# Altium footprint library Serigrafias.PcbLib: 12 footprints
Each footprint in its own frame and in the unit in brackets; x right, y up, seen from the top. Pads: shape width x height; smd on the part's side, far side on the other; paste and mask are expansions set on the pad; w line width, h text height; cw(c..) or ccw(c..) is an arc to the next point about the centre after c.
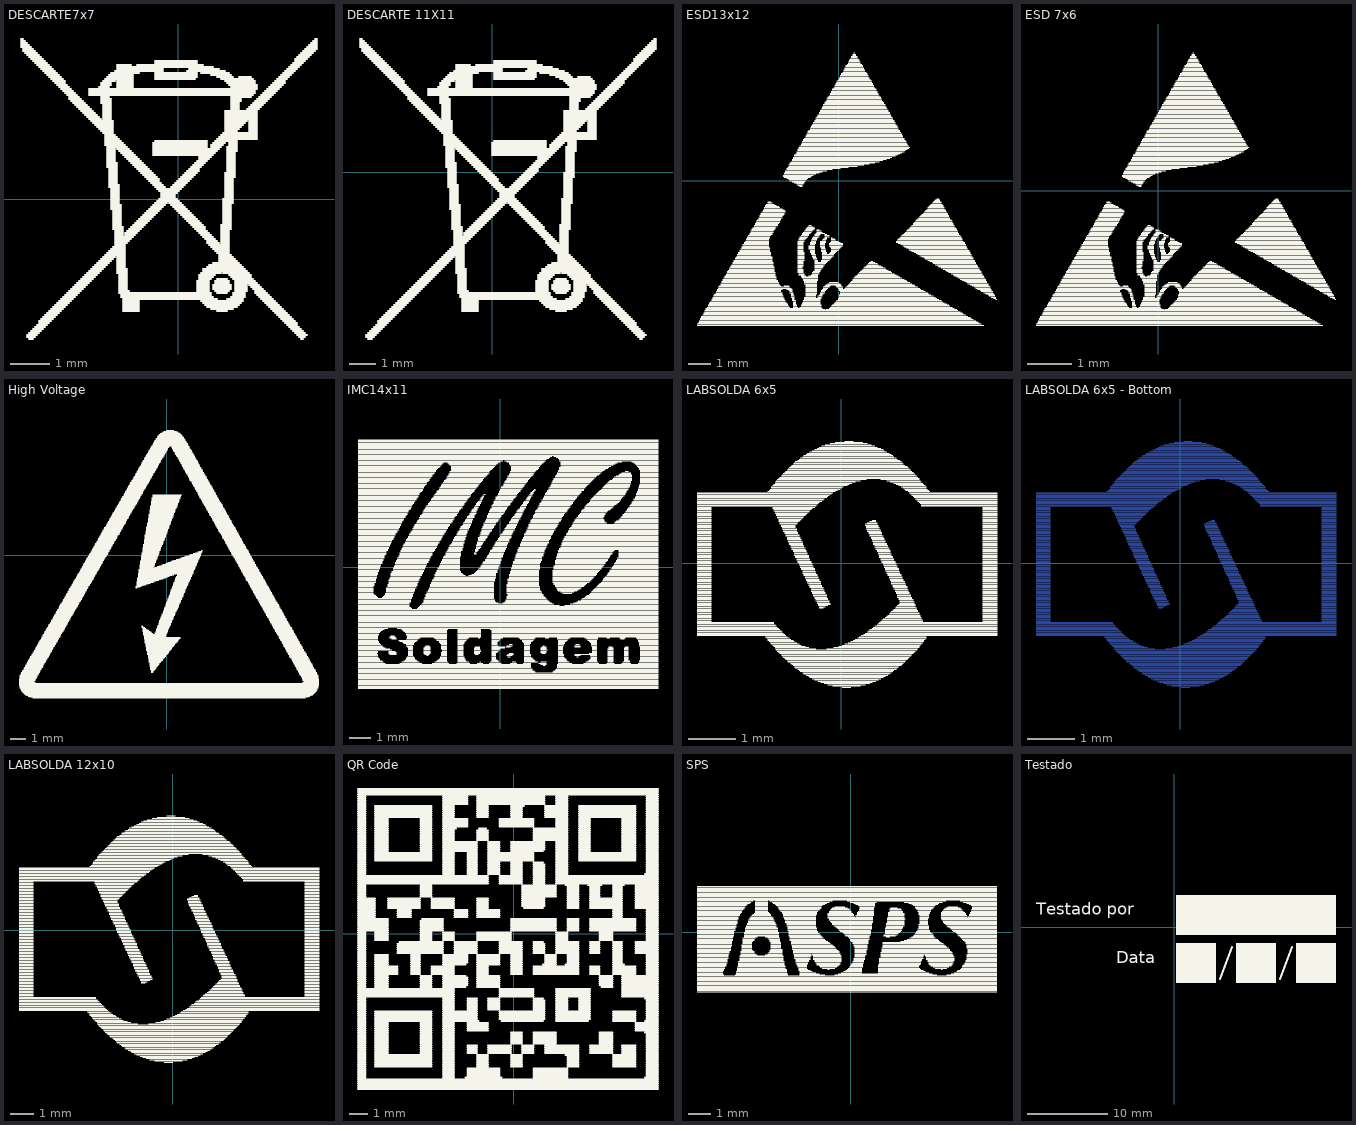
[diagram p0: the footprints below, top view; thin cyan lines are the x and y axes]

## DESCARTE7x7 [mm]
Top Overlay:
  drawing of 517 lines, arcs and shapes, not listed

## DESCARTE 11X11 [mm]
Top Overlay:
  drawing of 517 lines, arcs and shapes, not listed

## ESD13x12 [mm]
Top Overlay:
  drawing of 557 lines, arcs and shapes, not listed

## ESD 7x6 [mm]
Top Overlay:
  drawing of 557 lines, arcs and shapes, not listed

## High Voltage [mm]
Top Overlay:
  drawing of 950 lines, arcs and shapes, not listed

## IMC14x11 [mm]
Top Overlay:
  drawing of 1294 lines, arcs and shapes, not listed

## LABSOLDA 6x5 [mm]
Top Overlay:
  drawing of 518 lines, arcs and shapes, not listed

## LABSOLDA 6x5 - Bottom [mm]
Bottom Layer:
  lines w0.025: -3.048,-1.524 -1.168,-1.524 ; -3.048,-1.499 -1.194,-1.499 ; -3.048,-1.473 -1.219,-1.473 ; -3.048,-1.448 -1.245,-1.448 ; -3.048,-1.422 -1.27,-1.422 ; -3.048,-1.397 -1.295,-1.397 ; -3.048,-1.372 -1.321,-1.372 ; -3.048,-1.346 -1.346,-1.346 ; -3.048,-1.321 -1.372,-1.321 ; -3.048,-1.295 -1.397,-1.295 ; -3.048,-1.27 -1.422,-1.27 ; -3.048,-1.245 -1.422,-1.245 ; -3.048,-1.219 -2.743,-1.219 ; -3.048,-1.194 -2.743,-1.194 ; -3.048,-1.168 -2.743,-1.168 ; -3.048,-1.143 -2.743,-1.143 ; -3.048,-1.118 -2.743,-1.118 ; -3.048,-1.092 -2.743,-1.092 ; -3.048,-1.067 -2.743,-1.067 ; -3.048,-1.041 -2.743,-1.041 ; -3.048,-1.016 -2.743,-1.016 ; -3.048,-0.991 -2.743,-0.991 ; -3.048,-0.965 -2.743,-0.965 ; -3.048,-0.94 -2.743,-0.94 ; -3.048,-0.914 -2.743,-0.914 ; -3.048,-0.889 -2.743,-0.889 ; -3.048,-0.864 -2.743,-0.864 ; -3.048,-0.838 -2.743,-0.838 ; -3.048,-0.813 -2.743,-0.813 ; -3.048,-0.787 -2.743,-0.787 ; -3.048,-0.762 -2.743,-0.762 ; -3.048,-0.737 -2.743,-0.737 ; -3.048,-0.711 -2.743,-0.711 ; -3.048,-0.686 -2.743,-0.686 ; -3.048,-0.66 -2.743,-0.66 ; -3.048,-0.635 -2.743,-0.635 ; -3.048,-0.61 -2.743,-0.61 ; -3.048,-0.584 -2.743,-0.584 ; -3.048,-0.559 -2.743,-0.559 ; -3.048,-0.533 -2.743,-0.533 ; -3.048,-0.508 -2.743,-0.508 ; -3.048,-0.483 -2.743,-0.483 ; -3.048,-0.457 -2.743,-0.457 ; -3.048,-0.432 -2.743,-0.432 ; -3.048,-0.406 -2.743,-0.406 ; -3.048,-0.381 -2.743,-0.381 ; -3.048,-0.356 -2.743,-0.356 ; -3.048,-0.33 -2.743,-0.33 ; -3.048,-0.305 -2.743,-0.305 ; -3.048,-0.279 -2.743,-0.279 ; -3.048,-0.254 -2.743,-0.254 ; -3.048,-0.229 -2.743,-0.229 ; -3.048,-0.203 -2.743,-0.203 ; -3.048,-0.178 -2.743,-0.178 ; -3.048,-0.152 -2.743,-0.152 ; -3.048,-0.127 -2.743,-0.127 ; -3.048,-0.102 -2.743,-0.102 ; -3.048,-0.076 -2.743,-0.076 ; -3.048,-0.051 -2.743,-0.051 ; -3.048,-0.025 -2.743,-0.025 ; -3.048,0 -2.743,0 ; -3.048,0.025 -2.743,0.025 ; -3.048,0.051 -2.743,0.051 ; -3.048,0.076 -2.743,0.076 ; -3.048,0.102 -2.743,0.102 ; -3.048,0.127 -2.743,0.127 ; -3.048,0.152 -2.743,0.152 ; -3.048,0.178 -2.743,0.178 ; -3.048,0.203 -2.743,0.203 ; -3.048,0.229 -2.743,0.229 ; -3.048,0.254 -2.743,0.254 ; -3.048,0.279 -2.743,0.279 ; -3.048,0.305 -2.743,0.305 ; -3.048,0.33 -2.743,0.33 ; -3.048,0.356 -2.743,0.356 ; -3.048,0.381 -2.743,0.381 ; -3.048,0.406 -2.743,0.406 ; -3.048,0.432 -2.743,0.432 ; -3.048,0.457 -2.743,0.457 ; -3.048,0.483 -2.743,0.483 ; -3.048,0.508 -2.743,0.508 ; -3.048,0.533 -2.743,0.533 ; -3.048,0.559 -2.743,0.559 ; -3.048,0.584 -2.743,0.584 ; -3.048,0.61 -2.743,0.61 ; -3.048,0.635 -2.743,0.635 ; -3.048,0.66 -2.743,0.66 ; -3.048,0.686 -2.743,0.686 ; -3.048,0.711 -2.743,0.711 ; -3.048,0.737 -2.743,0.737 ; -3.048,0.762 -2.743,0.762 ; -3.048,0.787 -2.743,0.787 ; -3.048,0.813 -2.743,0.813 ; -3.048,0.838 -2.743,0.838 ; -3.048,0.864 -2.743,0.864 ; -3.048,0.889 -2.743,0.889 ; -3.048,0.914 -2.743,0.914 ; -3.048,0.94 -2.743,0.94 ; -3.048,0.965 -2.743,0.965 ; -3.048,0.991 -2.743,0.991 ; -3.048,1.016 -2.743,1.016 ; -3.048,1.041 -2.743,1.041 ; -3.048,1.067 -2.743,1.067 ; -3.048,1.092 -2.743,1.092 ; -3.048,1.118 -2.743,1.118 ; -3.048,1.143 -2.743,1.143 ; -3.048,1.168 -2.743,1.168 ; -3.048,1.194 -2.743,1.194 ; -3.048,1.219 -0.533,1.219 ; -3.048,1.245 -0.508,1.245 ; -3.048,1.27 -0.483,1.27 ; -3.048,1.295 -0.457,1.295 ; -3.048,1.321 -0.406,1.321 ; -3.048,1.346 -0.381,1.346 ; -3.048,1.372 -0.356,1.372 ; -3.048,1.397 -0.305,1.397 ; -3.048,1.422 -0.279,1.422 ; -3.048,1.448 -0.254,1.448 ; -3.048,1.473 -0.203,1.473 ; -3.048,1.499 -0.178,1.499 ; -1.6,-1.549 -1.143,-1.549 ; -1.575,-1.575 -1.092,-1.575 ; -1.549,-1.626 -1.016,-1.626 ; -1.549,-1.6 -1.067,-1.6 ; -1.549,1.524 -0.127,1.524 ; -1.524,-1.651 -0.991,-1.651 ; -1.524,1.549 -0.076,1.549 ; -1.499,-1.676 -0.94,-1.676 ; -1.499,1.575 -0.025,1.575 ; -1.473,-1.702 -0.889,-1.702 ; -1.473,1.6 0,1.6 ; -1.473,1.626 0.051,1.626 ; -1.448,-1.727 -0.838,-1.727 ; -1.448,1.168 -0.61,1.168 ; -1.448,1.194 -0.559,1.194 ; -1.448,1.651 0.127,1.651 ; -1.422,-1.753 -0.762,-1.753 ; -1.422,1.118 -0.66,1.118 ; -1.422,1.143 -0.635,1.143 ; -1.422,1.676 0.178,1.676 ; -1.397,-1.803 -0.533,-1.803 ; -1.397,-1.778 -0.686,-1.778 ; -1.397,1.067 -0.711,1.067 ; -1.397,1.092 -0.686,1.092 ; -1.397,1.702 0.229,1.702 ; -1.397,1.727 0.305,1.727 ; -1.372,-1.829 1.6,-1.829 ; -1.372,1.016 -0.762,1.016 ; -1.372,1.041 -0.737,1.041 ; -1.372,1.753 0.406,1.753 ; -1.346,-1.854 1.575,-1.854 ; -1.346,0.965 -0.813,0.965 ; -1.346,0.991 -0.787,0.991 ; -1.346,1.778 0.533,1.778 ; -1.321,-1.88 1.549,-1.88 ; -1.321,0.889 -0.889,0.889 ; -1.321,0.914 -0.864,0.914 ; -1.321,0.94 -0.838,0.94 ; -1.321,1.803 1.651,1.803 ; -1.295,-1.905 1.524,-1.905 ; -1.295,0.838 -0.94,0.838 ; -1.295,0.864 -0.914,0.864 ; -1.295,1.829 1.626,1.829 ; -1.27,-1.93 1.499,-1.93 ; -1.27,0.787 -0.965,0.787 ; -1.27,0.813 -0.965,0.813 ; -1.27,1.854 1.6,1.854 ; -1.245,-1.956 1.473,-1.956 ; -1.245,0.737 -0.94,0.737 ; -1.245,0.762 -0.965,0.762 ; -1.245,1.88 1.575,1.88 ; -1.219,-1.981 1.448,-1.981 ; -1.219,0.686 -0.94,0.686 ; -1.219,0.711 -0.94,0.711 ; -1.219,1.905 1.549,1.905 ; -1.194,-2.007 1.422,-2.007 ; -1.194,0.635 -0.914,0.635 ; -1.194,0.66 -0.914,0.66 ; -1.194,1.93 1.524,1.93 ; -1.168,-2.032 1.397,-2.032 ; -1.168,0.584 -0.889,0.584 ; -1.168,0.61 -0.889,0.61 ; -1.168,1.956 1.499,1.956 ; -1.143,-2.057 1.372,-2.057 ; -1.143,0.508 -0.838,0.508 ; -1.143,0.533 -0.864,0.533 ; -1.143,0.559 -0.864,0.559 ; -1.143,1.981 1.473,1.981 ; -1.118,-2.083 1.346,-2.083 ; -1.118,0.457 -0.813,0.457 ; -1.118,0.483 -0.838,0.483 ; -1.118,2.007 1.448,2.007 ; -1.092,0.406 -0.813,0.406 ; -1.092,0.432 -0.813,0.432 ; -1.092,2.032 1.422,2.032 ; -1.067,-2.108 1.321,-2.108 ; -1.067,0.356 -0.787,0.356 ; -1.067,0.381 -0.787,0.381 ; -1.067,2.057 1.397,2.057 ; -1.041,-2.134 1.295,-2.134 ; -1.041,0.305 -0.762,0.305 ; -1.041,0.33 -0.762,0.33 ; -1.041,2.083 1.346,2.083 ; -1.016,-2.159 1.27,-2.159 ; -1.016,0.254 -0.737,0.254 ; -1.016,0.279 -0.737,0.279 ; -1.016,2.108 1.321,2.108 ; -0.991,-2.184 1.219,-2.184 ; -0.991,0.178 -0.686,0.178 ; -0.991,0.203 -0.711,0.203 ; -0.991,0.229 -0.711,0.229 ; -0.991,2.134 1.295,2.134 ; -0.965,-2.21 1.194,-2.21 ; -0.965,0.127 -0.686,0.127 ; -0.965,0.152 -0.686,0.152 ; -0.965,2.159 1.27,2.159 ; -0.94,0.076 -0.66,0.076 ; -0.94,0.102 -0.66,0.102 ; -0.914,-2.235 1.168,-2.235 ; -0.914,0.025 -0.635,0.025 ; -0.914,0.051 -0.635,0.051 ; -0.914,2.184 1.245,2.184 ; -0.889,-2.261 1.118,-2.261 ; -0.889,-0.025 -0.61,-0.025 ; -0.889,0 -0.61,0 ; -0.889,2.21 1.194,2.21 ; -0.864,-2.286 1.092,-2.286 ; -0.864,-0.076 -0.584,-0.076 ; -0.864,-0.051 -0.584,-0.051 ; -0.864,2.235 1.168,2.235 ; -0.838,-0.127 -0.559,-0.127 ; -0.838,-0.102 -0.559,-0.102 ; -0.813,-2.311 1.067,-2.311 ; -0.813,-0.203 -0.533,-0.203 ; -0.813,-0.178 -0.533,-0.178 ; -0.813,-0.152 -0.559,-0.152 ; -0.813,2.261 1.118,2.261 ; -0.787,-2.337 1.016,-2.337 ; -0.787,-0.254 -0.508,-0.254 ; -0.787,-0.229 -0.508,-0.229 ; -0.787,2.286 1.092,2.286 ; -0.762,-0.305 -0.483,-0.305 ; -0.762,-0.279 -0.483,-0.279 ; -0.737,-2.362 0.991,-2.362 ; -0.737,-0.356 -0.457,-0.356 ; -0.737,-0.33 -0.457,-0.33 ; -0.737,2.311 1.067,2.311 ; -0.711,-0.406 -0.432,-0.406 ; -0.711,-0.381 -0.432,-0.381 ; -0.711,2.337 1.016,2.337 ; -0.686,-2.388 0.94,-2.388 ; -0.686,-0.457 -0.406,-0.457 ; -0.686,-0.432 -0.432,-0.432 ; -0.66,-2.413 0.889,-2.413 ; -0.66,-0.508 -0.381,-0.508 ; -0.66,-0.483 -0.406,-0.483 ; -0.66,2.362 0.965,2.362 ; -0.635,-0.584 -0.356,-0.584 ; -0.635,-0.559 -0.356,-0.559 ; -0.635,-0.533 -0.381,-0.533 ; -0.61,-2.438 0.838,-2.438 ; -0.61,-0.635 -0.33,-0.635 ; -0.61,-0.61 -0.33,-0.61 ; -0.61,2.388 0.914,2.388 ; -0.584,-0.686 -0.305,-0.686 ; -0.584,-0.66 -0.305,-0.66 ; -0.559,-2.464 0.787,-2.464 ; -0.559,-0.737 -0.279,-0.737 ; -0.559,-0.711 -0.305,-0.711 ; -0.559,2.413 0.889,2.413 ; -0.533,-0.787 -0.254,-0.787 ; -0.533,-0.762 -0.279,-0.762 ; -0.508,-0.838 -0.229,-0.838 ; -0.508,-0.813 -0.254,-0.813 ; -0.508,2.438 0.838,2.438 ; -0.483,-2.489 0.737,-2.489 ; -0.483,-0.889 -0.279,-0.889 ; -0.483,-0.864 -0.229,-0.864 ; -0.457,-0.94 -0.381,-0.94 ; -0.457,-0.914 -0.33,-0.914 ; -0.457,2.464 0.762,2.464 ; -0.432,-2.515 0.66,-2.515 ; -0.406,2.489 0.711,2.489 ; -0.356,-2.54 0.61,-2.54 ; -0.33,2.515 0.635,2.515 ; -0.305,-1.803 1.626,-1.803 ; -0.279,-2.565 0.508,-2.565 ; -0.229,2.54 0.559,2.54 ; -0.178,-2.591 0.406,-2.591 ; -0.152,-1.778 1.651,-1.778 ; -0.127,2.565 0.457,2.565 ; -0.051,-1.753 1.651,-1.753 ; 0.025,-2.616 0.203,-2.616 ; 0.025,-1.727 1.676,-1.727 ; 0.076,-1.702 1.702,-1.702 ; 0.076,2.591 0.254,2.591 ; 0.152,-1.676 1.727,-1.676 ; 0.203,-1.651 1.753,-1.651 ; 0.254,-1.626 1.753,-1.626 ; 0.305,-1.6 1.778,-1.6 ; 0.356,-1.575 1.803,-1.575 ; 0.381,-1.549 1.803,-1.549 ; 0.432,-1.524 3.302,-1.524 ; 0.483,-1.499 3.302,-1.499 ; 0.508,-1.473 3.302,-1.473 ; 0.508,0.813 0.787,0.813 ; 0.508,0.838 0.762,0.838 ; 0.533,0.737 0.813,0.737 ; 0.533,0.762 0.813,0.762 ; 0.533,0.787 0.787,0.787 ; 0.559,-1.448 3.302,-1.448 ; 0.559,0.686 0.838,0.686 ; 0.559,0.711 0.838,0.711 ; 0.559,0.864 0.762,0.864 ; 0.584,-1.422 3.302,-1.422 ; 0.584,0.635 0.864,0.635 ; 0.584,0.66 0.864,0.66 ; 0.61,-1.397 3.302,-1.397 ; 0.61,0.584 0.889,0.584 ; 0.61,0.61 0.864,0.61 ; 0.61,0.889 0.737,0.889 ; 0.635,0.533 0.914,0.533 ; 0.635,0.559 0.889,0.559 ; 0.66,-1.372 3.302,-1.372 ; 0.66,0.483 0.94,0.483 ; 0.66,0.508 0.914,0.508 ; 0.66,0.914 0.737,0.914 ; 0.686,-1.346 3.302,-1.346 ; 0.686,0.406 0.965,0.406 ; 0.686,0.432 0.965,0.432 ; 0.686,0.457 0.94,0.457 ; 0.711,-1.321 3.302,-1.321 ; 0.711,0.356 0.991,0.356 ; 0.711,0.381 0.991,0.381 ; 0.737,0.305 1.016,0.305 ; 0.737,0.33 1.016,0.33 ; 0.762,-1.295 3.302,-1.295 ; 0.762,0.254 1.041,0.254 ; 0.762,0.279 1.041,0.279 ; 0.787,-1.27 3.302,-1.27 ; 0.787,0.203 1.067,0.203 ; 0.787,0.229 1.041,0.229 ; 0.813,-1.245 3.302,-1.245 ; 0.813,0.127 1.092,0.127 ; 0.813,0.152 1.092,0.152 ; 0.813,0.178 1.067,0.178 ; 0.838,-1.219 1.727,-1.219 ; 0.838,0.076 1.118,0.076 ; 0.838,0.102 1.118,0.102 ; 0.838,1.778 1.651,1.778 ; 0.864,-1.194 1.727,-1.194 ; 0.864,0.025 1.143,0.025 ; 0.864,0.051 1.143,0.051 ; 0.889,-1.168 1.702,-1.168 ; 0.889,-0.025 1.168,-0.025 ; 0.889,0 1.168,0 ; 0.914,-0.076 1.194,-0.076 ; 0.914,-0.051 1.194,-0.051 ; 0.94,-1.143 1.702,-1.143 ; 0.94,-0.152 1.219,-0.152 ; 0.94,-0.127 1.219,-0.127 ; 0.94,-0.102 1.219,-0.102 ; 0.965,-1.118 1.676,-1.118 ; 0.965,-0.203 1.245,-0.203 ; 0.965,-0.178 1.245,-0.178 ; 0.965,1.753 1.676,1.753 ; 0.991,-1.092 1.676,-1.092 ; 0.991,-0.254 1.27,-0.254 ; 0.991,-0.229 1.27,-0.229 ; 1.016,-1.067 1.651,-1.067 ; 1.016,-0.305 1.295,-0.305 ; 1.016,-0.279 1.295,-0.279 ; 1.041,-1.041 1.651,-1.041 ; 1.041,-0.356 1.321,-0.356 ; 1.041,-0.33 1.321,-0.33 ; 1.041,1.727 1.702,1.727 ; 1.067,-1.016 1.626,-1.016 ; 1.067,-0.432 1.372,-0.432 ; 1.067,-0.406 1.346,-0.406 ; 1.067,-0.381 1.346,-0.381 ; 1.092,-0.991 1.626,-0.991 ; 1.092,-0.483 1.397,-0.483 ; 1.092,-0.457 1.372,-0.457 ; 1.118,-0.965 1.6,-0.965 ; 1.118,-0.533 1.397,-0.533 ; 1.118,-0.508 1.397,-0.508 ; 1.118,1.702 1.727,1.702 ; 1.143,-0.94 1.6,-0.94 ; 1.143,-0.584 1.422,-0.584 ; 1.143,-0.559 1.422,-0.559 ; 1.168,-0.914 1.575,-0.914 ; 1.168,-0.635 1.448,-0.635 ; 1.168,-0.61 1.448,-0.61 ; 1.168,1.676 1.753,1.676 ; 1.194,-0.889 1.575,-0.889 ; 1.194,-0.711 1.499,-0.711 ; 1.194,-0.686 1.473,-0.686 ; 1.194,-0.66 1.473,-0.66 ; 1.219,-0.864 1.575,-0.864 ; 1.219,-0.762 1.524,-0.762 ; 1.219,-0.737 1.499,-0.737 ; 1.219,1.651 1.778,1.651 ; 1.245,-0.838 1.549,-0.838 ; 1.245,-0.813 1.549,-0.813 ; 1.245,-0.787 1.524,-0.787 ; 1.27,1.626 1.803,1.626 ; 1.321,1.6 1.803,1.6 ; 1.346,1.575 1.829,1.575 ; 1.372,1.549 1.854,1.549 ; 1.422,1.524 1.88,1.524 ; 1.448,1.499 3.302,1.499 ; 1.473,1.473 3.302,1.473 ; 1.499,1.448 3.302,1.448 ; 1.524,1.422 3.302,1.422 ; 1.549,1.397 3.302,1.397 ; 1.575,1.372 3.302,1.372 ; 1.6,1.346 3.302,1.346 ; 1.626,1.321 3.302,1.321 ; 1.651,1.295 3.302,1.295 ; 1.676,1.27 3.302,1.27 ; 1.702,1.219 3.302,1.219 ; 1.702,1.245 3.302,1.245 ; 2.997,-1.219 3.302,-1.219 ; 2.997,-1.194 3.302,-1.194 ; 2.997,-1.168 3.302,-1.168 ; 2.997,-1.143 3.302,-1.143 ; 2.997,-1.118 3.302,-1.118 ; 2.997,-1.092 3.302,-1.092 ; 2.997,-1.067 3.302,-1.067 ; 2.997,-1.041 3.302,-1.041 ; 2.997,-1.016 3.302,-1.016 ; 2.997,-0.991 3.302,-0.991 ; 2.997,-0.965 3.302,-0.965 ; 2.997,-0.94 3.302,-0.94 ; 2.997,-0.914 3.302,-0.914 ; 2.997,-0.889 3.302,-0.889 ; 2.997,-0.864 3.302,-0.864 ; 2.997,-0.838 3.302,-0.838 ; 2.997,-0.813 3.302,-0.813 ; 2.997,-0.787 3.302,-0.787 ; 2.997,-0.762 3.302,-0.762 ; 2.997,-0.737 3.302,-0.737 ; 2.997,-0.711 3.302,-0.711 ; 2.997,-0.686 3.302,-0.686 ; 2.997,-0.66 3.302,-0.66 ; 2.997,-0.635 3.302,-0.635 ; 2.997,-0.61 3.302,-0.61 ; 2.997,-0.584 3.302,-0.584 ; 2.997,-0.559 3.302,-0.559 ; 2.997,-0.533 3.302,-0.533 ; 2.997,-0.508 3.302,-0.508 ; 2.997,-0.483 3.302,-0.483 ; 2.997,-0.457 3.302,-0.457 ; 2.997,-0.432 3.302,-0.432 ; 2.997,-0.406 3.302,-0.406 ; 2.997,-0.381 3.302,-0.381 ; 2.997,-0.356 3.302,-0.356 ; 2.997,-0.33 3.302,-0.33 ; 2.997,-0.305 3.302,-0.305 ; 2.997,-0.279 3.302,-0.279 ; 2.997,-0.254 3.302,-0.254 ; 2.997,-0.229 3.302,-0.229 ; 2.997,-0.203 3.302,-0.203 ; 2.997,-0.178 3.302,-0.178 ; 2.997,-0.152 3.302,-0.152 ; 2.997,-0.127 3.302,-0.127 ; 2.997,-0.102 3.302,-0.102 ; 2.997,-0.076 3.302,-0.076 ; 2.997,-0.051 3.302,-0.051 ; 2.997,-0.025 3.302,-0.025 ; 2.997,0 3.302,0 ; 2.997,0.025 3.302,0.025 ; 2.997,0.051 3.302,0.051 ; 2.997,0.076 3.302,0.076 ; 2.997,0.102 3.302,0.102 ; 2.997,0.127 3.302,0.127 ; 2.997,0.152 3.302,0.152 ; 2.997,0.178 3.302,0.178 ; 2.997,0.203 3.302,0.203 ; 2.997,0.229 3.302,0.229 ; 2.997,0.254 3.302,0.254 ; 2.997,0.279 3.302,0.279 ; 2.997,0.305 3.302,0.305 ; 2.997,0.33 3.302,0.33 ; 2.997,0.356 3.302,0.356 ; 2.997,0.381 3.302,0.381 ; 2.997,0.406 3.302,0.406 ; 2.997,0.432 3.302,0.432 ; 2.997,0.457 3.302,0.457 ; 2.997,0.483 3.302,0.483 ; 2.997,0.508 3.302,0.508 ; 2.997,0.533 3.302,0.533 ; 2.997,0.559 3.302,0.559 ; 2.997,0.584 3.302,0.584 ; 2.997,0.61 3.302,0.61 ; 2.997,0.635 3.302,0.635 ; 2.997,0.66 3.302,0.66 ; 2.997,0.686 3.302,0.686 ; 2.997,0.711 3.302,0.711 ; 2.997,0.737 3.302,0.737 ; 2.997,0.762 3.302,0.762 ; 2.997,0.787 3.302,0.787 ; 2.997,0.813 3.302,0.813 ; 2.997,0.838 3.302,0.838 ; 2.997,0.864 3.302,0.864 ; 2.997,0.889 3.302,0.889 ; 2.997,0.914 3.302,0.914 ; 2.997,0.94 3.302,0.94 ; 2.997,0.965 3.302,0.965 ; 2.997,0.991 3.302,0.991 ; 2.997,1.016 3.302,1.016 ; 2.997,1.041 3.302,1.041 ; 2.997,1.067 3.302,1.067 ; 2.997,1.092 3.302,1.092 ; 2.997,1.118 3.302,1.118 ; 2.997,1.143 3.302,1.143 ; 2.997,1.168 3.302,1.168 ; 2.997,1.194 3.302,1.194

## LABSOLDA 12x10 [mm]
Top Overlay:
  drawing of 518 lines, arcs and shapes, not listed

## QR Code [mm] "16x16mm"
Top Overlay:
  drawing of 1151 lines, arcs and shapes, not listed

## SPS [mm]
Top Overlay:
  drawing of 520 lines, arcs and shapes, not listed

## Testado [mm]
Top Overlay:
  rectangle: 15.198,-6.968 20.198,-1.968
  rectangle: 7.698,-6.968 12.698,-1.968
  rectangle: 0.198,-6.968 5.198,-1.968
  rectangle: 0.198,-0.968 20.198,4.032
  lines w0.254: 5.698,-6.468 7.198,-2.468 ; 13.198,-6.468 14.698,-2.468
  text "Data" at -7.302,-4.468 h1.52
  text "Testado por" at -17.302,1.532 h1.52